# Altium schematic symbol library P05_ECG.SchLib: 26 symbols
Pins are listed as number, name and electrical type; pins without a type are passive.

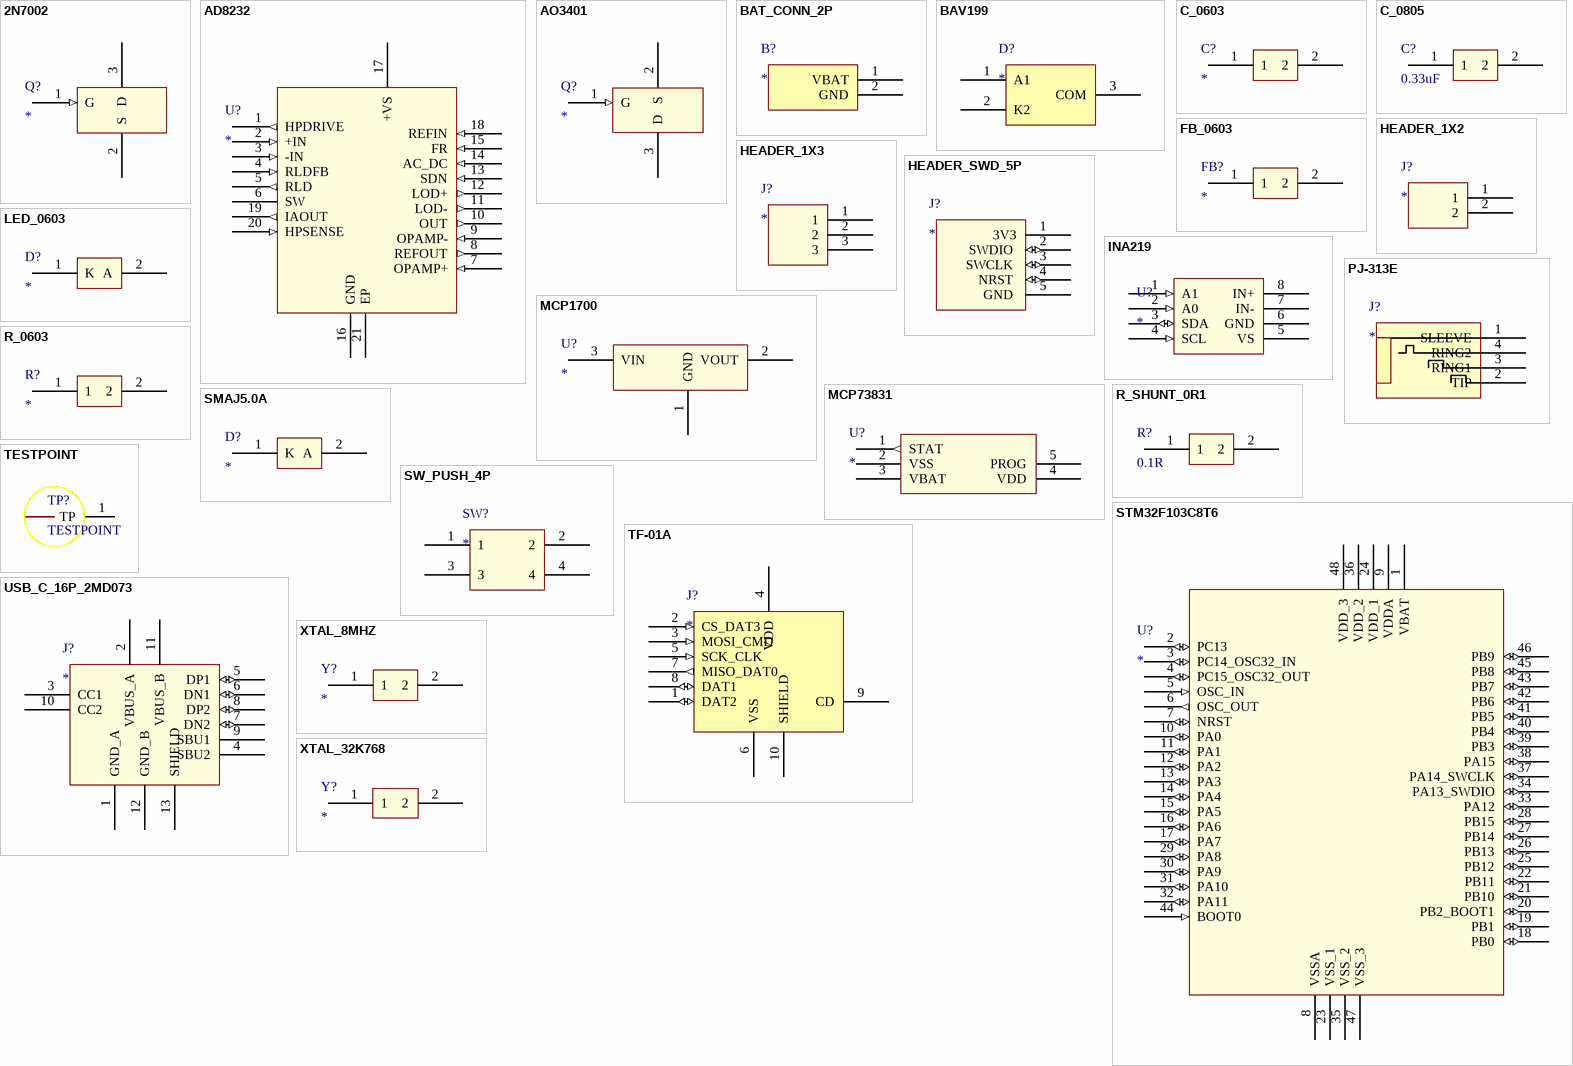
[diagram p0: symbols 2N7002 to XTAL_32K768]

## 2N7002
designator Q?
N-Channel MOSFET 60V 0.3A SOT-23
footprint SOT23_3 (SOT23, 3-Leads, Body 2.86x2.37mm, Pitch 0.95mm, IPC Medium Density)
pins: 1 G (in), 2 S, 3 D

## AD8232
designator U?
AD8232
footprint LFCSP20_4x4_P0.5 (LFCSP20, 4x4mm body, pitch 0.5mm, exposed pad, AD8232)
pins: 1 HPDRIVE (out), 2 +IN (in), 3 -IN (in), 4 RLDFB (in), 5 RLD (out), 6 SW, 7 OPAMP+ (in), 8 REFOUT (out), 9 OPAMP- (in), 10 OUT (out), 11 LOD- (out), 12 LOD+ (out), 13 SDN (in), 14 AC_DC (in), 15 FR (in), 16 GND (power), 17 +VS (power), 18 REFIN (in), 19 IAOUT (out), 20 HPSENSE (in), 21 EP

## AO3401
designator Q?
AO3401
footprint SOT23_3 (SOT23, 3-Leads, Body 2.86x2.37mm, Pitch 0.95mm, IPC Medium Density)
pins: 1 G (in), 2 S, 3 D

## BAT_CONN_2P
designator B?
BAT_CONN_2P
footprint JST_B2B-PH-K-S (JST PH 2.0mm Pitch 2-Pin Header B2B-PH-K-S)
pins: 1 VBAT (power), 2 GND

## BAV199
designator D?
BAV199
footprint SOT23_3 (SOT23, 3-Leads, Body 2.86x2.37mm, Pitch 0.95mm, IPC Medium Density)
pins: 1 A1, 2 K2, 3 COM

## C_0603
designator C?
C_0603
footprint CHIP_0603 (Chip 0603 (1608 metric), dung chung R, C, ferrite bead)
pins: 1, 2

## C_0805
designator C?, comment 0.33uF
Capacitor 0805 C0G/Film for HPF filter
footprint CAP_0805 (Chip Capacitor 0805 (2012 metric))
pins: 1, 2

## FB_0603
designator FB?
FB_0603
footprint CHIP_0603 (Chip 0603 (1608 metric), dung chung R, C, ferrite bead)
pins: 1, 2

## HEADER_1X2
designator J?
HEADER_1X2
footprint HDR_1X2_P2.54 (Header 1x2 Pin Pitch 2.54mm Through-Hole)
pins: 1, 2

## HEADER_1X3
designator J?
HEADER_1X3
footprint HDR_1X3_P2.54 (Header 1x3 Pin Pitch 2.54mm Through-Hole)
pins: 1, 2, 3

## HEADER_SWD_5P
designator J?
HEADER_SWD_5P
footprint HDR_1X5_P2.54 (Header 1x5 Pin Pitch 2.54mm Through-Hole (SWD))
pins: 1 3V3 (power), 2 SWDIO  (io), 3 SWCLK  (io), 4 NRST  (io), 5 GND  (power)

## INA219
designator U?
INA219
footprint SOIC8_3.9x4.9 (SOIC-8, 3.9x4.9mm body, pitch 1.27mm, INA219)
pins: 1 A1 (in), 2 A0 (in), 3 SDA (io), 4 SCL (in), 5 VS (power), 6 GND (power), 7 IN-, 8 IN+

## LED_0603
designator D?
LED_0603
footprint CHIP_0603 (Chip 0603 (1608 metric), dung chung R, C, ferrite bead)
pins: 1 K, 2 A

## MCP1700
designator U?
LDO 3.3V 250mA, Iq 1.6uA.
footprint SOT23_3 (SOT23, 3-Leads, Body 2.86x2.37mm, Pitch 0.95mm, IPC Medium Density)
pins: 1 GND (power), 2 VOUT (power), 3 VIN (power)

## MCP73831
designator U?
MCP73831
footprint SOT23_5 (SOT-23-5, pitch 0.95mm, MCP73831)
pins: 1 STAT (out), 2 VSS (power), 3 VBAT, 4 VDD (power), 5 PROG

## PJ-313E
designator J?
3.5mm SMD Audio/ECG Jack
footprint JACK_3.5MM_PJ313E (3.5mm SMD Audio/ECG Jack PJ-313E)
pins: 1 SLEEVE, 2 TIP, 3 RING1, 4 RING2

## R_0603
designator R?
R_0603
footprint CHIP_0603 (Chip 0603 (1608 metric), dung chung R, C, ferrite bead)
pins: 1, 2

## R_SHUNT_0R1
designator R?, comment 0.1R
Current Sense Resistor 0.1 Ohm 1% 0603
footprint CHIP_0603 (Chip 0603 (1608 metric), dung chung R, C, ferrite bead)
pins: 1, 2

## SMAJ5.0A
designator D?
DIODE_SMA_DO214AC
footprint DIODE_SMA_DO214AC (TVS Diode SMA DO-214AC)
pins: 1 K, 2 A

## STM32F103C8T6
designator U?
STM32F103C8T6
footprint LQFP48_7x7_P0.5 (LQFP48, 7x7mm body, pitch 0.5mm, STM32F103C8T6)
pins: 1 VBAT (power), 2 PC13 (io), 3 PC14_OSC32_IN (io), 4 PC15_OSC32_OUT (io), 5 OSC_IN (in), 6 OSC_OUT (out), 7 NRST (io), 8 VSSA (power), 9 VDDA (power), 10 PA0 (io), 11 PA1 (io), 12 PA2 (io), 13 PA3 (io), 14 PA4 (io), 15 PA5 (io), 16 PA6 (io), 17 PA7 (io), 18 PB0 (io), 19 PB1 (io), 20 PB2_BOOT1 (io), 21 PB10 (io), 22 PB11 (io), 23 VSS_1 (power), 24 VDD_1 (power), 25 PB12 (io), 26 PB13 (io), 27 PB14 (io), 28 PB15 (io), 29 PA8 (io), 30 PA9 (io), 31 PA10 (io), 32 PA11 (io), 33 PA12 (io), 34 PA13_SWDIO (io), 35 VSS_2 (power), 36 VDD_2 (power), 37 PA14_SWCLK (io), 38 PA15 (io), 39 PB3 (io), 40 PB4 (io), 41 PB5 (io), 42 PB6 (io), 43 PB7 (io), 44 BOOT0 (in), 45 PB8 (io), 46 PB9 (io), 47 VSS_3 (power), 48 VDD_3 (power)

## SW_PUSH_4P
designator SW?
SW_PUSH_4P
footprint SW_SMD_TS1187A (Tactile Switch SMD 5.1x5.1mm TS-1187A)
pins: 1, 2, 3, 4

## TESTPOINT
designator TP?
footprint TESTPOINT_1MM (SMD Test Point Pad 1.0mm Round)
pins: 1 TP

## TF-01A
designator J?
TF-01A
footprint TF-01A (Height = 1.90mm, Description = MicroSD Card Socket Push-Push TF-01A)
pins: 1 DAT2 (io), 2 CS_DAT3 (in), 3 MOSI_CMD (in), 4 VDD (power), 5 SCK_CLK (in), 6 VSS (power), 7 MISO_DAT0 (out), 8 DAT1 (io), 9 CD, 10 SHIELD

## USB_C_16P_2MD073
designator J?
USB_C_16P_2MD073
footprint USB_C_16P_2MD073 (USB Type-C 16-Pin SMD SHOUHAN 2MD(073))
pins: 1 GND_A (power), 2 VBUS_A (power), 3 CC1, 4 SBU2, 5 DP1 (io), 6 DN1 (io), 7 DN2 (io), 8 DP2 (io), 9 SBU1, 10 CC2, 11 VBUS_B (power), 12 GND_B (power), 13 SHIELD

## XTAL_8MHZ
designator Y?
XTAL_8MHZ
footprint XTAL_5032_2P (SMD Crystal 5.0x3.2mm 2-Pad YSX530GA)
pins: 1, 2

## XTAL_32K768
designator Y?
XTAL_32K768
footprint XTAL_3215 (Y?)
pins: 1, 2